# Altium footprint library ACB_PcbLib.PcbLib: 167 footprints (part 2 of 11)
Each footprint in its own frame and in the unit in brackets; x right, y up, seen from the top. Pads: shape width x height; smd on the part's side, far side on the other; paste and mask are expansions set on the pad; w line width, h text height; cw(c..) or ccw(c..) is an arc to the next point about the centre after c.
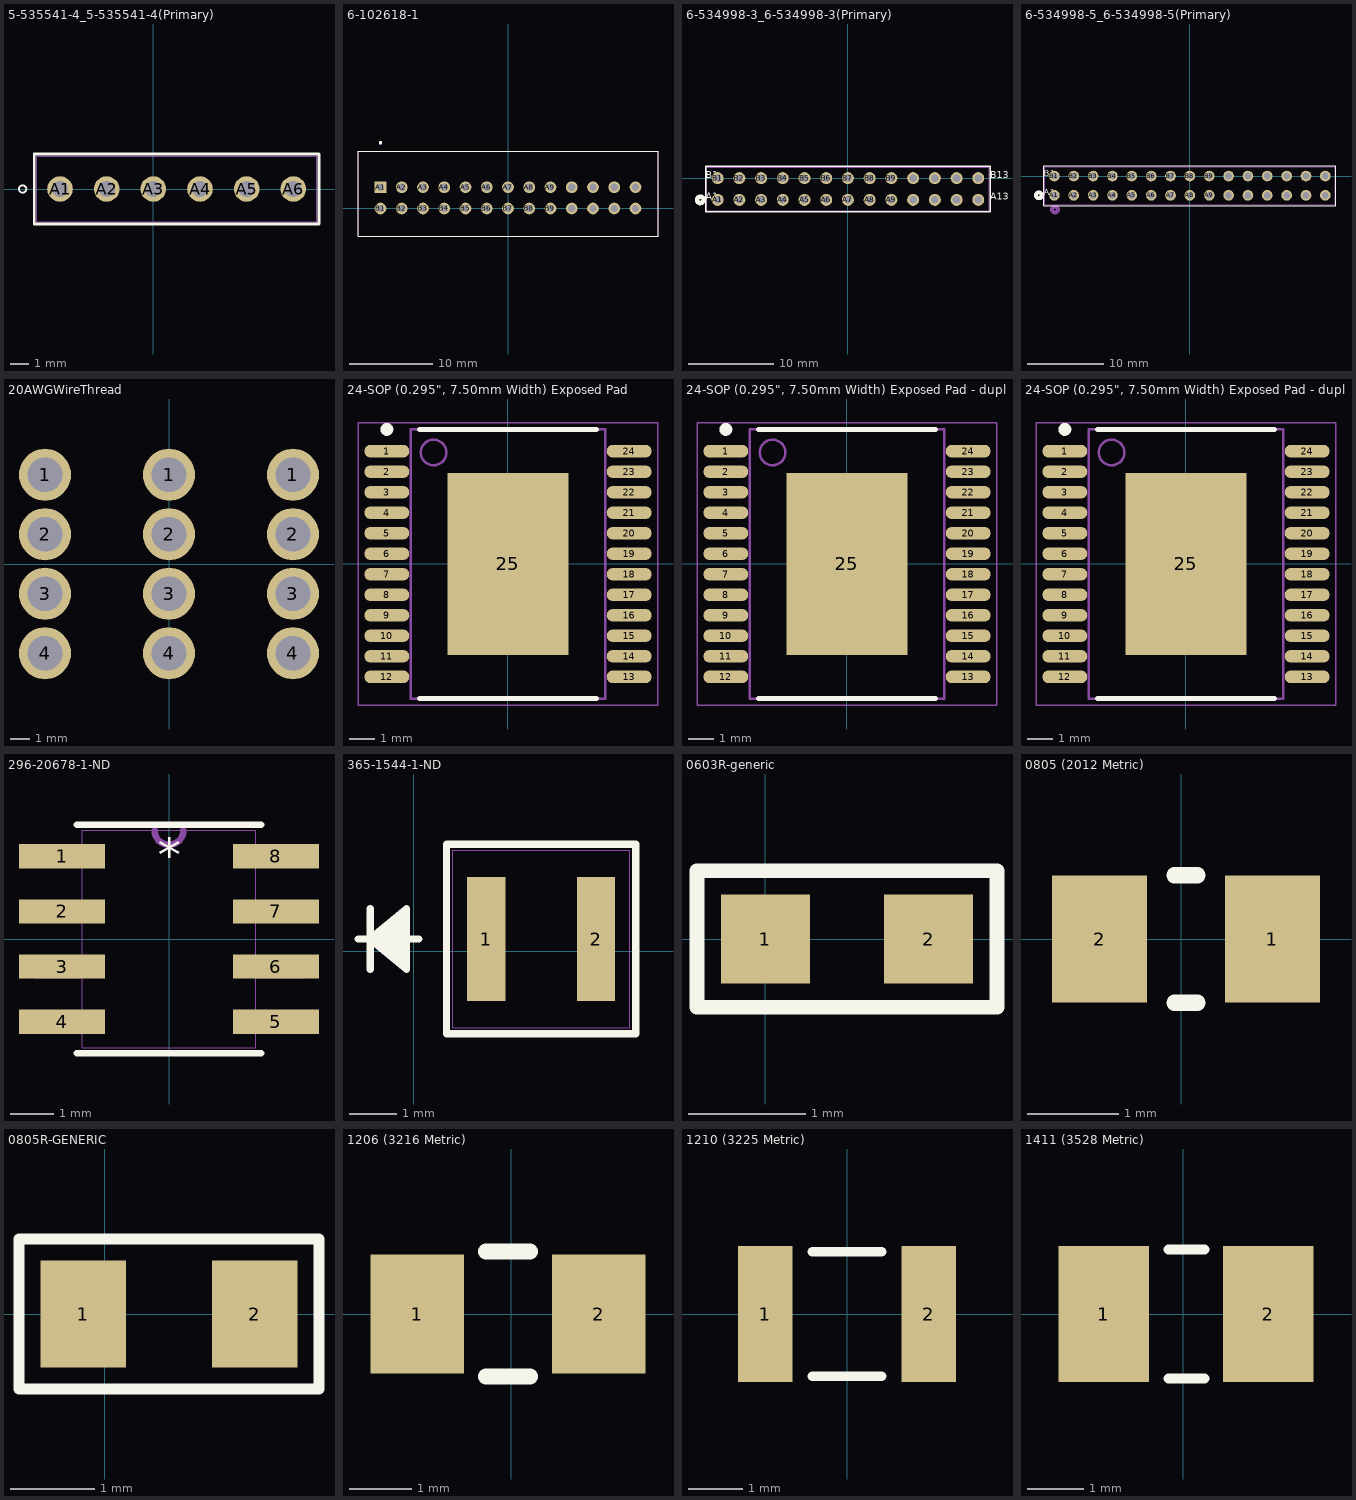
[diagram p1: the footprints below, top view; thin cyan lines are the x and y axes]

## 5-535541-4_5-535541-4(Primary) [mil]
pads (6):
  round 55 hole 35 mask-1000: A1(-200,0) A2(-100,0) A3(0,0) A4(100,0) A5(200,0) A6(300,0)
Top Overlay:
  circle w3.94: c-280,0 r7.87
  lines w6: -255,-75 355,-75 355,75 -255,75 -255,-75
Top Paste:
  drawing of 6 lines, arcs and shapes, not listed
Top Solder:
  drawing of 6 lines, arcs and shapes, not listed
Bottom Solder:
  drawing of 6 lines, arcs and shapes, not listed
Mechanical 1:
  lines w1: -250,-70 350,-70 350,70 -250,70 -250,-70
3D body "5-535541-4.step": height 245, standoff -170, extent -250.78,-70 349.22,70

## 6-102618-1 [mil] "26 Pin 2 rows"
pads (26):
  rect 55x55 hole 35: A1(-600,100)
  round 55 hole 35: A2(-500,100) A3(-400,100) A4(-300,100) A5(-200,100) A6(-100,100) A7(0,100) A8(100,100) A9(200,100) A10(300,100) A11(400,100) A12(500,100) A13(600,100) B1(-600,0) B2(-500,0) B3(-400,0) B4(-300,0) B5(-200,0) B6(-100,0) B7(0,0) B8(100,0) B9(200,0) B10(300,0) B11(400,0) B12(500,0) B13(600,0)
Top Overlay:
  circle w7.87: c-600,309.37 r3.94
  lines w5: -705.98,-130 705.98,-130 705.98,270 -705.98,270 -705.98,-130
Mechanical 4:
  circle w7.87: c-600,309.37 r3.94
  circle w7.87: c-600,309.37 r3.94
  lines w5: -705.98,-130 705.98,-130 ; -705.98,-130 -705.98,270 ; -705.98,-130 705.98,-130 ; -705.98,-130 -705.98,270 ; -705.98,270 705.98,270 ; -705.98,270 705.98,270 ; 705.98,-130 705.98,270 ; 705.98,-130 705.98,270
3D body "c-0102618-61-k-3d.stp": height 452.76, standoff -112.24, extent -706,-128.82 706,271.18

## 6-534998-3_6-534998-3(Primary) [mil]
pads (26):
  round 55 hole 35 mask-1000: A1(-600,-99.02) A2(-500,-99.02) A3(-400,-99.02) A4(-300,-99.02) A5(-200,-99.02) A6(-100,-99.02) A7(0,-99.02) A8(100,-99.02) A9(200,-99.02) A10(300,-99.02) A11(400,-99.02) A12(500,-99.02) A13(600,-99.02) B1(-600,0.98) B2(-500,0.98) B3(-400,0.98) B4(-300,0.98) B5(-200,0.98) B6(-100,0.98) B7(0,0.98) B8(100,0.98) B9(200,0.98) B10(300,0.98) B11(400,0.98) B12(500,0.98) B13(600,0.98)
Top Overlay:
  circle w20: c-680,-99.02 r15
  lines w6: -655,-153.02 655,-153.02 655,54.98 -655,54.98 -655,-153.02
  text "A1" at -655,-99.02 h31.25
  text "B1" at -655,0.98 h31.25
  text "A13" at 655,-99.02 h31.25
  text "B13" at 655,0.98 h31.25
Top Paste:
  drawing of 26 lines, arcs and shapes, not listed
Top Solder:
  drawing of 26 lines, arcs and shapes, not listed
Bottom Solder:
  drawing of 26 lines, arcs and shapes, not listed
Mechanical 1:
  lines w1: -650,-148.02 650,-148.02 650,49.98 -650,49.98 -650,-148.02
3D body "6-534998-3.step": height 245, standoff -170, extent -650.39,-148.42 649.61,51.58

## 6-534998-5_6-534998-5(Primary) [mil]
pads (30):
  round 55 hole 35 mask-1000: A1(-700,-100) A2(-600,-100) A3(-500,-100) A4(-400,-100) A5(-300,-100) A6(-200,-100) A7(-100,-100) A8(0,-100) A9(100,-100) A10(200,-100) A11(300,-100) A12(400,-100) A13(500,-100) A14(600,-100) A15(700,-100) B1(-700,0) B2(-600,0) B3(-500,0) B4(-400,0) B5(-300,0) B6(-200,0) B7(-100,0) B8(0,0) B9(100,0) B10(200,0) B11(300,0) B12(400,0) B13(500,0) B14(600,0) B15(700,0)
Top Overlay:
  circle w20: c-780,-100 r15
  lines w6: -755,-154 755,-154 755,54 -755,54 -755,-154
  text "A1" at -755,-100 h31.25
  text "B1" at -755,0 h31.25
Bottom Overlay:
  circle w20: c-780,-100 r15
  text "A1" at -755,-100 h31.25
  text "B1" at -755,0 h31.25
Top Paste:
  drawing of 30 lines, arcs and shapes, not listed
Top Solder:
  drawing of 30 lines, arcs and shapes, not listed
Bottom Solder:
  drawing of 30 lines, arcs and shapes, not listed
Mechanical 1:
  circle w20: c-697.05,-173.03 r15
  lines w1: -750,-149 750,-149 750,49 -750,49 -750,-149
  text "A1" at -755,-100 h31.25
  text "B1" at -755,0 h31.25
3D body "6-534998-5.step": height 245, standoff -170, extent -749.99,-149.99 750.01,50.01

## 20AWGWireThread [mil] "20 AWG wire strain relief using threading"
pads (12):
  round 105 hole 70: 1(-250,180) 1(0,180) 1(250,180) 2(-250,60) 2(0,60) 2(250,60) 3(-250,-60) 3(0,-60) 3(250,-60) 4(-250,-180) 4(0,-180) 4(250,-180)

## 24-SOP (0.295", 7.50mm Width) Exposed Pad [mm] "VNQ5050KTR-E"
height 2.45
pads (25):
  oval 1.75x0.5 smd: 1(-4.725,4.4) 2(-4.725,3.6) 3(-4.725,2.8) 4(-4.725,2) 5(-4.725,1.2) 6(-4.725,0.4) 7(-4.725,-0.4) 8(-4.725,-1.2) 9(-4.725,-2) 10(-4.725,-2.8) 11(-4.725,-3.6) 12(-4.725,-4.4) 13(4.725,-4.4) 14(4.725,-3.6) 15(4.725,-2.8) 16(4.725,-2) 17(4.725,-1.2) 18(4.725,-0.4) 19(4.725,0.4) 20(4.725,1.2) 21(4.725,2) 22(4.725,2.8) 23(4.725,3.6) 24(4.725,4.4)
  rect 4.7x7.1 smd: 25(0,0)
Top Overlay:
  circle w0.25: c-4.725,5.25 r0.125
  lines w0.2: -3.45,-5.25 3.45,-5.25 ; -3.45,5.25 3.45,5.25
Mechanical 13:
  circle w0.1: c-2.9,4.35 r0.5
  lines w0.1: -3.8,-5.25 -3.8,5.25 3.8,5.25 3.8,-5.25 -3.8,-5.25
Mechanical 15:
  lines w0.05: -5.85,-5.5 -5.85,5.5 5.85,5.5 5.85,-5.5 -5.85,-5.5
  lines w0.1: -0.5,0 0.5,0 ; 0,-0.5 0,0.5
3D body: height 2.45, standoff 0.1, extent -3.8,-5.25 3.8,5.25

## 24-SOP (0.295", 7.50mm Width) Exposed Pad - duplicate [mm] "VNQ5050KTR-E"
height 2.45
pads (25):
  oval 1.75x0.5 smd: 1(-4.725,4.4) 2(-4.725,3.6) 3(-4.725,2.8) 4(-4.725,2) 5(-4.725,1.2) 6(-4.725,0.4) 7(-4.725,-0.4) 8(-4.725,-1.2) 9(-4.725,-2) 10(-4.725,-2.8) 11(-4.725,-3.6) 12(-4.725,-4.4) 13(4.725,-4.4) 14(4.725,-3.6) 15(4.725,-2.8) 16(4.725,-2) 17(4.725,-1.2) 18(4.725,-0.4) 19(4.725,0.4) 20(4.725,1.2) 21(4.725,2) 22(4.725,2.8) 23(4.725,3.6) 24(4.725,4.4)
  rect 4.7x7.1 smd: 25(0,0)
Top Overlay:
  circle w0.25: c-4.725,5.25 r0.125
  lines w0.2: -3.45,-5.25 3.45,-5.25 ; -3.45,5.25 3.45,5.25
Mechanical 13:
  circle w0.1: c-2.9,4.35 r0.5
  lines w0.1: -3.8,-5.25 3.8,-5.25 3.8,5.25 -3.8,5.25 -3.8,-5.25
Mechanical 15:
  lines w0.05: -5.85,-5.5 5.85,-5.5 5.85,5.5 -5.85,5.5 -5.85,-5.5
  lines w0.1: -0.5,0 0.5,0 ; 0,-0.5 0,0.5
3D body: height 2.45, standoff 0.1, extent -3.8,-5.25 3.8,5.25

## 24-SOP (0.295", 7.50mm Width) Exposed Pad - duplicate1 [mm] "VNQ5050KTR-E"
height 2.45
pads (25):
  oval 1.75x0.5 smd: 1(-4.725,4.4) 2(-4.725,3.6) 3(-4.725,2.8) 4(-4.725,2) 5(-4.725,1.2) 6(-4.725,0.4) 7(-4.725,-0.4) 8(-4.725,-1.2) 9(-4.725,-2) 10(-4.725,-2.8) 11(-4.725,-3.6) 12(-4.725,-4.4) 13(4.725,-4.4) 14(4.725,-3.6) 15(4.725,-2.8) 16(4.725,-2) 17(4.725,-1.2) 18(4.725,-0.4) 19(4.725,0.4) 20(4.725,1.2) 21(4.725,2) 22(4.725,2.8) 23(4.725,3.6) 24(4.725,4.4)
  rect 4.7x7.1 smd: 25(0,0)
Top Overlay:
  circle w0.25: c-4.725,5.25 r0.125
  lines w0.2: -3.45,-5.25 3.45,-5.25 ; -3.45,5.25 3.45,5.25
Mechanical 13:
  circle w0.1: c-2.9,4.35 r0.5
  lines w0.1: -3.8,-5.25 3.8,-5.25 3.8,5.25 -3.8,5.25 -3.8,-5.25
Mechanical 15:
  lines w0.05: -5.85,-5.5 5.85,-5.5 5.85,5.5 -5.85,5.5 -5.85,-5.5
  lines w0.1: -0.5,0 0.5,0 ; 0,-0.5 0,0.5
3D body: height 2.45, standoff 0.1, extent -3.8,-5.25 3.8,5.25

## 296-20678-1-ND [mil] "IC REG LIN POS ADJ 100MA 8SOIC"
pads (8):
  rect 78x22 smd: 1(-97,75) 2(-97,25) 3(-97,-25) 4(-97,-75) 5(97,-75) 6(97,-25) 7(97,25) 8(97,75)
Top Overlay:
  lines w6: -83.5,-103.5 83.5,-103.5 ; -83.5,103.5 83.5,103.5
  text "*" at -10,60 h31.25
Mechanical 1:
  lines w1: -12,98.5 ccw(c0,98.5) 12,98.5 ; -122,-85 -122,-65 -78.5,-65 -78.5,-85 -122,-85 ; -122,-35 -122,-15 -78.5,-15 -78.5,-35 -122,-35 ; -122,15 -122,35 -78.5,35 -78.5,15 -122,15 ; -122,65 -122,85 -78.5,85 -78.5,65 -122,65 ; -78.5,-98.5 78.5,-98.5 78.5,98.5 -78.5,98.5 -78.5,-98.5 ; 78.5,-85 78.5,-65 122,-65 122,-85 78.5,-85 ; 78.5,-35 78.5,-15 122,-15 122,-35 78.5,-35 ; 78.5,15 78.5,35 122,35 122,15 78.5,15 ; 78.5,65 78.5,85 122,85 122,65 78.5,65
Mechanical 16:
  lines w6: -13.08,98.5 ccw(c0,98.5) 13.08,98.5
3D body "D8.step": height 69.09, standoff 0, extent -122.01,-97 122.01,100

## 365-1544-1-ND [mil] "Blue LED"
pads (2):
  rect 31.5x102 smd: 1(59.75,10) 2(150.25,10)
Top Overlay:
  lines w6: -46,10 4,10 ; -36,-15 -36,35 ; -6,-10 -36,10 ; -6,-5 -36,10 ; -6,0 -36,10 ; -6,5 -36,10 ; -6,15 -36,10 ; -6,20 -36,10 ; -6,25 -36,10 ; -6,30 -36,10 ; -36,10 -6,35 -6,-15 -36,10 ; 27,-68 183,-68 183,88 27,88 27,-68
Mechanical 1:
  lines w1: -46,10 4,10 ; -36,-15 -36,35 ; -6,-10 -36,10 ; -6,-5 -36,10 ; -6,0 -36,10 ; -6,5 -36,10 ; -6,15 -36,10 ; -6,20 -36,10 ; -6,25 -36,10 ; -6,30 -36,10 ; -36,10 -6,35 -6,-15 -36,10 ; 32,-63 178,-63 178,83 32,83 32,-63
3D body "OVS5MxBCR4.STEP": height 49.21, standoff 0, extent 33.6,-59.05 176.4,78.74

## 0603R-generic [mil] "RESISTOR 0603"
pads (2):
  rect 30x30 smd: 1(0,0) 2(55,0)
Top Overlay:
  lines w5: -23,-23 -23,23 78,23 78,-23 -23,-23
3D body: height 16, standoff 15, extent 39.5,-10.5 44.5,-0.5
3D body: height 16, standoff 15, extent 32,-10.5 37,-0.5
3D body: height 16, standoff 15, extent 28.5,0.5 33.5,10.5
3D body: height 16, standoff 15, extent 21,0.5 26,10.5
3D body: height 16, standoff 15, extent 6,0.5 11,10.5
3D body: height 18, standoff 0, extent -3,-14 58,14
3D body: height 19, standoff 18, extent 5,-13 50,13
3D body: height 19, standoff 0, extent 50,-15 59,15
3D body: height 19, standoff 0, extent -4,-15 5,15
3D body: height 16, standoff 15, extent 13.5,0.5 18.5,10.5
3D body: height 16, standoff 15, extent 36,0.5 41,10.5
3D body: height 16, standoff 15, extent 43.5,0.5 48.5,10.5
3D body: height 16, standoff 15, extent 24.5,-10.5 29.5,-0.5
3D body: height 16, standoff 15, extent 17,-10.5 22,-0.5
3D body: height 16, standoff 15, extent 9.5,-10.5 14.5,-0.5

## 0805 (2012 Metric) [mil]
pads (2):
  rect 41x55 smd: 1(39.37,0) 2(-35.43,0)
Top Overlay:
  lines w7: -2.95,-27.56 6.89,-27.56 ; -2.95,27.56 6.89,27.56
3D body: height 31.5, standoff 0, extent -38.5,-28.56 41.5,27.44

## 0805R-GENERIC [mil] "RESISTOR 0805"
pads (2):
  rect 40x50 smd: 1(-10,0) 2(70,0)
Top Overlay:
  lines w5: -40,-35 -40,35 100,35 100,-35 -40,-35
3D body: height 27, standoff 26, extent 49.5,2 57,17
3D body: height 27, standoff 26, extent 39.5,2 47,17
3D body: height 25, standoff 0, extent -10,-24 69,24
3D body: height 26, standoff 0, extent -11,-25 5,25
3D body: height 26, standoff 25, extent 5,-22 54,22
3D body: height 26, standoff 0, extent 54,-25 70,25
3D body: height 27, standoff 26, extent 15,-15.5 22.5,-0.5
3D body: height 27, standoff 26, extent -0.5,2 7,17
3D body: height 27, standoff 26, extent 9.5,2 17,17
3D body: height 27, standoff 26, extent 19.5,2 27,17
3D body: height 27, standoff 26, extent 29.5,2 37,17
3D body: height 27, standoff 26, extent 25,-15.5 32.5,-0.5
3D body: height 27, standoff 26, extent 5,-15.5 12.5,-0.5
3D body: height 27, standoff 26, extent 35,-15.5 42.5,-0.5
3D body: height 27, standoff 26, extent 45,-15.5 52.5,-0.5

## 1206 (3216 Metric) [mm]
pads (2):
  rect 1.5x1.9 smd: 1(-1.5,0) 2(1.4,0)
Top Overlay:
  lines w0.254: -0.4,-1 0.3,-1 ; -0.4,1 0.3,1
3D body: height 1.3, standoff 0, extent -1.397,-0.889 1.4,0.889

## 1210 (3225 Metric) [mm]
pads (2):
  rect 1x2.5 smd: 1(-1.5,0) 2(1.5,0)
Top Overlay:
  lines w0.178: -0.635,-1.143 0.635,-1.143 ; -0.635,1.143 0.635,1.143
3D body: height 0.76, standoff 0.05, extent -1.45,-1.2 1.45,1.2

## 1411 (3528 Metric) [mm]
pads (2):
  rect 1.6x2.4 smd: 1(-1.397,0) 2(1.503,0)
Top Overlay:
  lines w0.178: -0.254,-1.143 0.381,-1.143 ; -0.254,1.143 0.381,1.143